# Altium schematic symbol library Altium_Library.SchLib: 822 symbols (part 17 of 17)
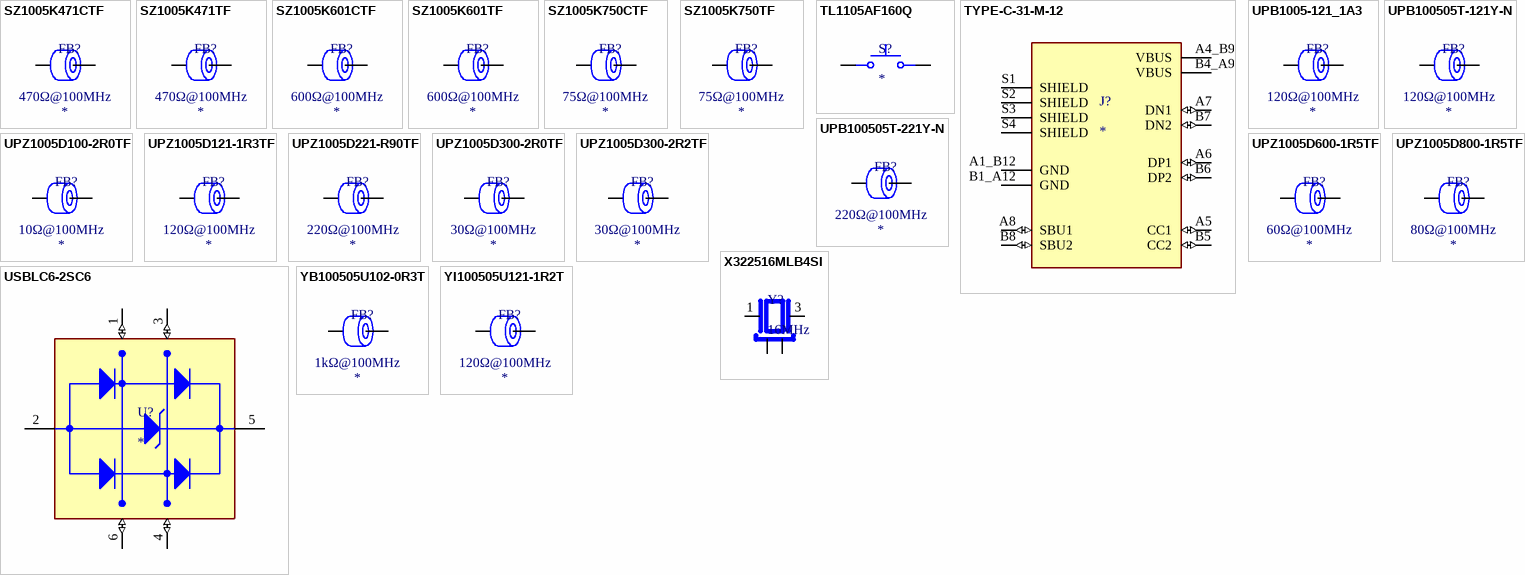
[diagram p36: symbols SZ1005K471CTF to YI100505U121-1R2T]

## YB100505U102-0R3T
designator FB?  Impedance @ Frequency: 1kΩ@100MHz
Ferrite, 1kΩ@100MHz, ±25%, 1Ω, 300mA, SMD 0402; Manufacturer: YJYCOIN; Manufacturer Part Number: YB100505U102-0R3T; Package Size: 0402; JLCPCB Basic Part: No; JLCPCB Part Number: C3011206; Supplier 1: LCSC; Category: Ferrite Beads; Supplier Part Number 1: C3011206; Tolerance: ±25%; Rated Current: 300mA; DC Resistance: 1Ω; RoHS: Yes; ComponentLink1Description: Datasheet; ComponentLink1URL: https://wmsc.lcsc.com/wmsc/upload/file/pdf/v2/lcsc/2205091530_YJYCOIN-YB100505U102-0R3T_C3011206.pdf; ComponentLink2Description: JLCPCB Part URL; ComponentLink2URL: https://jlcpcb.com/partdetail/C3011206; ComponentLink3Description: LCSC Part URL; ComponentLink3URL: https://lcsc.com/product-detail/Ferrite-Beads_YJYCOIN-YJYCOIN-YB100505U102-0R3T_C3011206.html
footprint FB-0402 (0402 (1005M) Ferrite)
pins: 1, 2

## YI100505U121-1R2T
designator FB?  Impedance @ Frequency: 120Ω@100MHz
Ferrite, 120Ω@100MHz, ±25%, 200mΩ, 1.2A, SMD 0402; Manufacturer: YJYCOIN; Manufacturer Part Number: YI100505U121-1R2T; Package Size: 0402; JLCPCB Basic Part: No; JLCPCB Part Number: C3011208; Supplier 1: LCSC; Category: Ferrite Beads; Supplier Part Number 1: C3011208; Tolerance: ±25%; Rated Current: 1.2A; DC Resistance: 200mΩ; RoHS: Yes; ComponentLink1Description: Datasheet; ComponentLink1URL: https://wmsc.lcsc.com/wmsc/upload/file/pdf/v2/lcsc/2205091530_YJYCOIN-YI100505U121-1R2T_C3011208.pdf; ComponentLink2Description: JLCPCB Part URL; ComponentLink2URL: https://jlcpcb.com/partdetail/C3011208; ComponentLink3Description: LCSC Part URL; ComponentLink3URL: https://lcsc.com/product-detail/Ferrite-Beads_YJYCOIN-YJYCOIN-YI100505U121-1R2T_C3011208.html
footprint FB-0402 (0402 (1005M) Ferrite)
pins: 1, 2